# Altium footprint library Orion-Bridge.PcbLib: 20 footprints (part 2 of 2)
Each footprint in its own frame and in the unit in brackets; x right, y up, seen from the top. Pads: shape width x height; smd on the part's side, far side on the other; paste and mask are expansions set on the pad; w line width, h text height; cw(c..) or ccw(c..) is an arc to the next point about the centre after c.
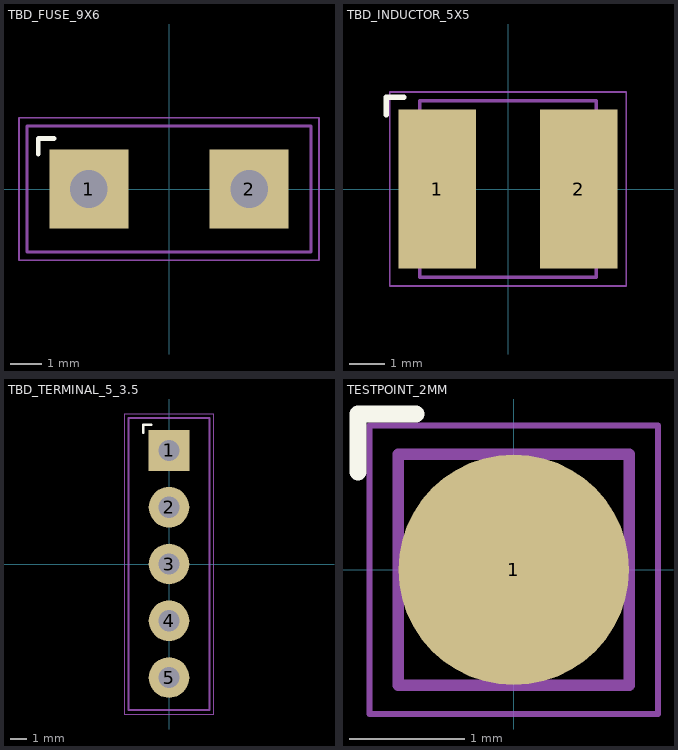
[diagram p1: the footprints below, top view; thin cyan lines are the x and y axes]

## TBD_FUSE_9X6 [mm] "TBD fuse T0.8A >=60V; placeholder pads, not a selected fuse"
height 5
pads (2):
  rect 2.5x2.5 hole 1.2: 1(-2.54,0) 2(2.54,0)
Top Overlay:
  lines w0.15: -4.14,1.1 -4.14,1.6 -3.64,1.6
Component bodies:
  lines w0.1: -4.5,-2 4.5,-2 4.5,2 -4.5,2 -4.5,-2
Courtyards:
  lines w0.05: -4.75,-2.25 4.75,-2.25 4.75,2.25 -4.75,2.25 -4.75,-2.25

## TBD_INDUCTOR_5X5 [mm] "TBD 15uH >=1A inductor; replace footprint after MPN selection"
height 3
pads (2):
  rect 2.2x4.5 smd: 1(-2,0) 2(2,0)
Top Overlay:
  lines w0.15: -3.45,2.1 -3.45,2.6 -2.95,2.6
Component bodies:
  lines w0.1: -2.5,-2.5 2.5,-2.5 2.5,2.5 -2.5,2.5 -2.5,-2.5
Courtyards:
  lines w0.05: -3.35,-2.75 3.35,-2.75 3.35,2.75 -3.35,2.75 -3.35,-2.75

## TBD_TERMINAL_5_3.5 [mm] "TBD 5-wire pigtail pads; final connector, holes and strain relief required"
height 5
pads (5):
  rect 2.5x2.5 hole 1.3: 1(0,7)
  round 2.5 hole 1.3: 2(0,3.5) 3(0,0) 4(0,-3.5) 5(0,-7)
Top Overlay:
  lines w0.15: -1.6,8.1 -1.6,8.6 -1.1,8.6
Component bodies:
  lines w0.1: -2.5,-9 2.5,-9 2.5,9 -2.5,9 -2.5,-9
Courtyards:
  lines w0.05: -2.75,-9.25 2.75,-9.25 2.75,9.25 -2.75,9.25 -2.75,-9.25

## TESTPOINT_2MM [mm] "2 mm exposed top-copper test pad; no paste"
pads (1):
  round 2 smd: 1(0,0)
Top Overlay:
  lines w0.15: -1.35,0.85 -1.35,1.35 -0.85,1.35
Component bodies:
  lines w0.1: -1,-1 1,-1 1,1 -1,1 -1,-1
Courtyards:
  lines w0.05: -1.25,-1.25 1.25,-1.25 1.25,1.25 -1.25,1.25 -1.25,-1.25